# Altium footprint library D15S13A4PA00LF.PcbLib: 1 footprints
Each footprint in its own frame and in the unit in brackets; x right, y up, seen from the top. Pads: shape width x height; smd on the part's side, far side on the other; paste and mask are expansions set on the pad; w line width, h text height; cw(c..) or ccw(c..) is an arc to the next point about the centre after c.
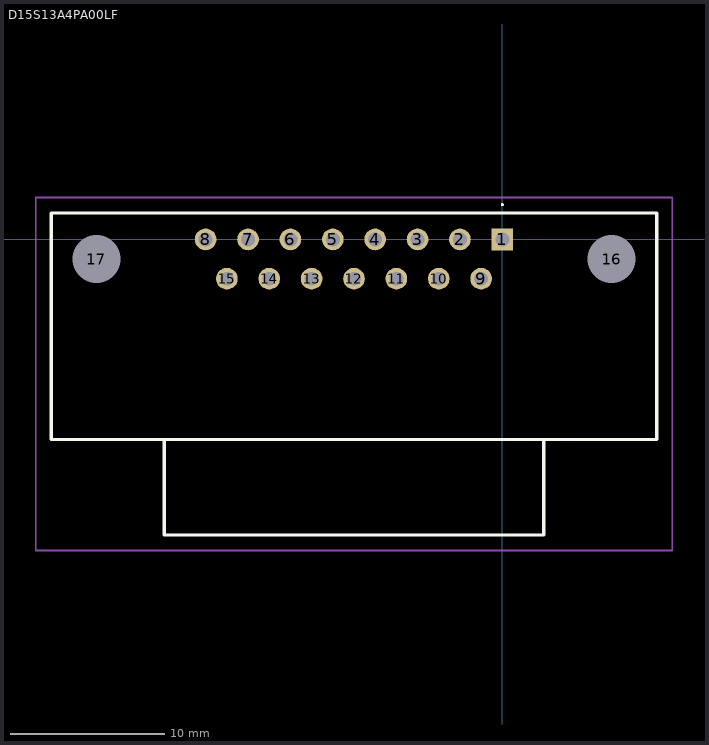
[diagram p0: the footprint, top view; thin cyan lines are the x and y axes]

## D15S13A4PA00LF [mm]
pads (17):
  rect 1.4x1.4 hole 0.9: 1(0,0)
  round 1.4 hole 0.9: 2(-2.74,0) 3(-5.48,0) 4(-8.22,0) 5(-10.96,0) 6(-13.7,0) 7(-16.44,0) 8(-19.18,0) 9(-1.37,-2.54) 10(-4.11,-2.54) 11(-6.85,-2.54) 12(-9.59,-2.54) 13(-12.33,-2.54) 14(-15.07,-2.54) 15(-17.81,-2.54)
  round 1.55 hole 3.1 unplated: 16(7.07,-1.27) 17(-26.25,-1.27)
Top Overlay:
  lines w0.1: 0,2.2 0,2.2 ; 0,2.2 ccw(c0,2.25) 0,2.3 ; 0,2.2 cw(c0,2.25) 0,2.3 ; 0,2.3 0,2.3
  lines w0.2: -21.86,-12.94 -21.86,-19.11 2.68,-19.11 2.68,-12.94 ; -29.16,-12.94 9.98,-12.94 9.98,1.71 -29.16,1.71 -29.16,-12.94
Mechanical 15:
  lines w0.1: -21.86,-12.94 -21.86,-19.11 2.68,-19.11 2.68,-12.94 ; -29.16,-12.94 9.98,-12.94 9.98,1.71 -29.16,1.71 -29.16,-12.94
Mechanical 20:
  lines w0.1: -30.16,-20.11 10.98,-20.11 10.98,2.71 -30.16,2.71 -30.16,-20.11